# Altium schematic symbol library 470pF_12010_3225.SchLib: 1 symbol
Pins are listed as number, name and electrical type; pins without a type are passive.

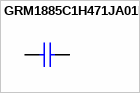
[diagram p0: symbol GRM1885C1H471JA01D]

## GRM1885C1H471JA01D
designator C?  (value not drawn)
470 pF, 50 V, C0G, 0603; JLCPCB Part #: C85979; Supplier 1: Avnet; Supplier Part Number 1: GRM1885C1H471JA01D
footprint C_0603_1608Metric (Chip Ceramic Capacitor, 2-Leads, Body 1.60x0.80mm, IPC Medium Density, Samsung 0603 Reference)
pins: 1, 2